# Altium schematic symbol library Magnetic.SchLib: 1 symbol
Pins are listed as number, name and electrical type; pins without a type are passive.

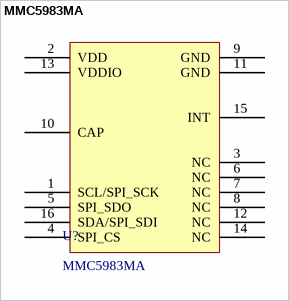
[diagram p0: symbol MMC5983MA]

## MMC5983MA
designator U?
±8 Gauss, High Performance 3-axis Magnetic Sensor; Manufacturer: MEMSIC; Current Rating: 450 uA; Supply Voltage - Max: 3.6 V; Supply Voltage - Min: 2.8 V; Operating Point Max: 8G; Operating Point Min: -8G; Resolution: 18 bit; Sensitivity: 16384 count/g; ComponentLink1Description: Datasheet; ComponentLink1URL: https://www.lcsc.com/datasheet/C404329.pdf?spm=wm.sxq.inf.ggs___wm.ssy.em.0.tz&lcsc_vid=FlkIUABWQVJeAgZfQwdWUlcFT1ZYUV1ST1deUwVWQ1IxVlNfQ1RaU1FXRVZeUzsOAxUeFF5JWBYZEEoKFBINSQcJGk4eFQsCAgIaSgADAwAHC0slRVNaUl1SQlVADxALGw%3D%3D; LCSC Part #: C404329; Manufacturer Part Number: MMC5983MA; Mount: SMD/SMT; Operating Temperature Max: + 105 C; Operating Temperature Min: - 40 C; Package / Case: LGA-16; Packaging: Tape and Reel; Supplier 1 Part Number: 438-MMC5983MA; Supplier 1 URL: https://www.mouser.vn/en/ProductDetail/MEMSIC/MMC5983MA?qs=B6kkDfuK7%2FD5qasHMdEt2g%3D%3D; Supplier 1: Mouser; Supplier 2 Part Number: 1267-MMC5983MATR-ND; Supplier 2 URL: https://www.digikey.com/en/products/detail/memsic-inc/mmc5983ma/10452795; Supplier 2: Digi-Key; Supplier 3 Part Number: N/A; Supplier 3 URL: N/A; Supplier 3: thegioiic; Value: MMC5983MA; Moisture Sensitive: Yes; Type: 3-Axis
footprint MMC5983MA_LGA-16 (PQFN, 16-Leads, Body 3.00x3.00mm, Pitch 0.50mm, IPC Medium Density)
pins: 1 SCL/SPI_SCK, 2 VDD, 3 NC, 4 SPI_CS, 5 SPI_SDO, 6 NC, 7 NC, 8 NC, 9 GND, 10 CAP, 11 GND, 12 NC, 13 VDDIO, 14 NC, 15 INT, 16 SDA/SPI_SDI